# Altium footprint library WR-FPC_0.50mm.PcbLib: 147 footprints (part 3 of 10)
Each footprint in its own frame and in the unit in brackets; x right, y up, seen from the top. Pads: shape width x height; smd on the part's side, far side on the other; paste and mask are expansions set on the pad; w line width, h text height; cw(c..) or ccw(c..) is an arc to the next point about the centre after c.
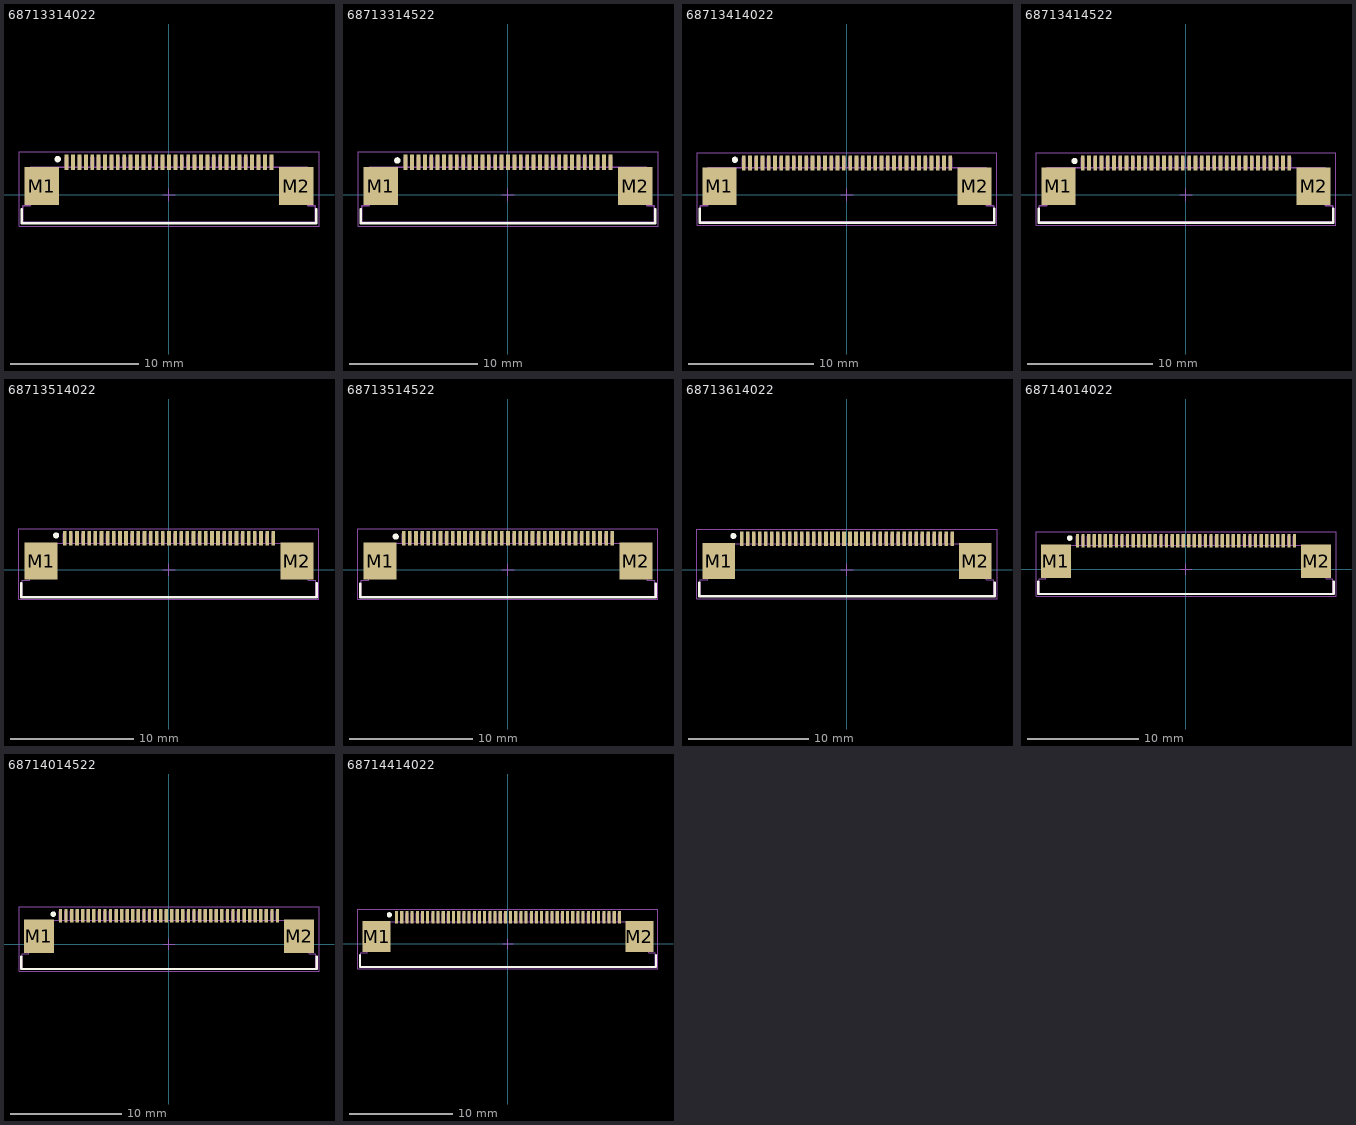
[diagram p2: the footprints below, top view; thin cyan lines are the x and y axes]

## 68713314022 [mm] "ZIF Connectors, Horizontal, Top Contact, pitch 0.5mm, 33p"
height 2.25
pads (35):
  rect 0.3x1.2 smd: 1(-8,2.56) 2(-7.5,2.56) 3(-7,2.56) 4(-6.5,2.56) 5(-6,2.56) 6(-5.5,2.56) 7(-5,2.56) 8(-4.5,2.56) 9(-4,2.56) 10(-3.5,2.56) 11(-3,2.56) 12(-2.5,2.56) 13(-2,2.56) 14(-1.5,2.56) 15(-1,2.56) 16(-0.5,2.56) 17(0,2.56) 18(0.5,2.56) 19(1,2.56) 20(1.5,2.56) 21(2,2.56) 22(2.5,2.56) 23(3,2.56) 24(3.5,2.56) 25(4,2.56) 26(4.5,2.56) 27(5,2.56) 28(5.5,2.56) 29(6,2.56) 30(6.5,2.56) 31(7,2.56) 32(7.5,2.56) 33(8,2.56)
  rect 2.7x3 smd: M1(-9.93,0.7) M2(9.93,0.7)
Top Overlay:
  circle w0.25: c-8.7,2.8 r0.125
  lines w0.2: -11.525,-1.1 -11.525,-2.225 11.525,-2.225 11.525,-1.1
Top Designator:
  text ".Designator" at -7.498,-0.5 h1.5
Top Component Outline:
  lines w0.1: -8.1,2.15 -8.1,2.95 -7.9,2.95 -7.9,2.15 ; -7.6,2.15 -7.6,2.95 -7.4,2.95 -7.4,2.15 ; -7.1,2.15 -7.1,2.95 -6.9,2.95 -6.9,2.15 ; -6.6,2.15 -6.6,2.95 -6.4,2.95 -6.4,2.15 ; -6.1,2.15 -6.1,2.95 -5.9,2.95 -5.9,2.15 ; -5.6,2.15 -5.6,2.95 -5.4,2.95 -5.4,2.15 ; -5.1,2.15 -5.1,2.95 -4.9,2.95 -4.9,2.15 ; -4.6,2.15 -4.6,2.95 -4.4,2.95 -4.4,2.15 ; -4.1,2.15 -4.1,2.95 -3.9,2.95 -3.9,2.15 ; -3.6,2.15 -3.6,2.95 -3.4,2.95 -3.4,2.15 ; -3.1,2.15 -3.1,2.95 -2.9,2.95 -2.9,2.15 ; -2.6,2.15 -2.6,2.95 -2.4,2.95 -2.4,2.15 ; -2.1,2.15 -2.1,2.95 -1.9,2.95 -1.9,2.15 ; -1.6,2.15 -1.6,2.95 -1.4,2.95 -1.4,2.15 ; -1.1,2.15 -1.1,2.95 -0.9,2.95 -0.9,2.15 ; -0.6,2.15 -0.6,2.95 -0.4,2.95 -0.4,2.15 ; -0.1,2.15 -0.1,2.95 0.1,2.95 0.1,2.15 ; 0.4,2.15 0.4,2.95 0.6,2.95 0.6,2.15 ; 0.9,2.15 0.9,2.95 1.1,2.95 1.1,2.15 ; 1.4,2.15 1.4,2.95 1.6,2.95 1.6,2.15 ; 1.9,2.15 1.9,2.95 2.1,2.95 2.1,2.15 ; 2.4,2.15 2.4,2.95 2.6,2.95 2.6,2.15 ; 2.9,2.15 2.9,2.95 3.1,2.95 3.1,2.15 ; 3.4,2.15 3.4,2.95 3.6,2.95 3.6,2.15 ; 3.9,2.15 3.9,2.95 4.1,2.95 4.1,2.15 ; 4.4,2.15 4.4,2.95 4.6,2.95 4.6,2.15 ; 4.9,2.15 4.9,2.95 5.1,2.95 5.1,2.15 ; 5.4,2.15 5.4,2.95 5.6,2.95 5.6,2.15 ; 5.9,2.15 5.9,2.95 6.1,2.95 6.1,2.15 ; 6.4,2.15 6.4,2.95 6.6,2.95 6.6,2.15 ; 6.9,2.15 6.9,2.95 7.1,2.95 7.1,2.15 ; 7.4,2.15 7.4,2.95 7.6,2.95 7.6,2.15 ; 7.9,2.15 7.9,2.95 8.1,2.95 8.1,2.15 ; -11.45,-2.15 -11.45,-0.85 -10.85,-0.85 -10.85,2.15 10.85,2.15 10.85,-0.85 11.45,-0.85 11.45,-2.15 -11.45,-2.15
Top 3D Body:
  lines w0.1: -8.1,2.15 -8.1,2.95 -7.9,2.95 -7.9,2.15 ; -7.6,2.15 -7.6,2.95 -7.4,2.95 -7.4,2.15 ; -7.1,2.15 -7.1,2.95 -6.9,2.95 -6.9,2.15 ; -6.6,2.15 -6.6,2.95 -6.4,2.95 -6.4,2.15 ; -6.1,2.15 -6.1,2.95 -5.9,2.95 -5.9,2.15 ; -5.6,2.15 -5.6,2.95 -5.4,2.95 -5.4,2.15 ; -5.1,2.15 -5.1,2.95 -4.9,2.95 -4.9,2.15 ; -4.6,2.15 -4.6,2.95 -4.4,2.95 -4.4,2.15 ; -4.1,2.15 -4.1,2.95 -3.9,2.95 -3.9,2.15 ; -3.6,2.15 -3.6,2.95 -3.4,2.95 -3.4,2.15 ; -3.1,2.15 -3.1,2.95 -2.9,2.95 -2.9,2.15 ; -2.6,2.15 -2.6,2.95 -2.4,2.95 -2.4,2.15 ; -2.1,2.15 -2.1,2.95 -1.9,2.95 -1.9,2.15 ; -1.6,2.15 -1.6,2.95 -1.4,2.95 -1.4,2.15 ; -1.1,2.15 -1.1,2.95 -0.9,2.95 -0.9,2.15 ; -0.6,2.15 -0.6,2.95 -0.4,2.95 -0.4,2.15 ; -0.1,2.15 -0.1,2.95 0.1,2.95 0.1,2.15 ; 0.4,2.15 0.4,2.95 0.6,2.95 0.6,2.15 ; 0.9,2.15 0.9,2.95 1.1,2.95 1.1,2.15 ; 1.4,2.15 1.4,2.95 1.6,2.95 1.6,2.15 ; 1.9,2.15 1.9,2.95 2.1,2.95 2.1,2.15 ; 2.4,2.15 2.4,2.95 2.6,2.95 2.6,2.15 ; 2.9,2.15 2.9,2.95 3.1,2.95 3.1,2.15 ; 3.4,2.15 3.4,2.95 3.6,2.95 3.6,2.15 ; 3.9,2.15 3.9,2.95 4.1,2.95 4.1,2.15 ; 4.4,2.15 4.4,2.95 4.6,2.95 4.6,2.15 ; 4.9,2.15 4.9,2.95 5.1,2.95 5.1,2.15 ; 5.4,2.15 5.4,2.95 5.6,2.95 5.6,2.15 ; 5.9,2.15 5.9,2.95 6.1,2.95 6.1,2.15 ; 6.4,2.15 6.4,2.95 6.6,2.95 6.6,2.15 ; 6.9,2.15 6.9,2.95 7.1,2.95 7.1,2.15 ; 7.4,2.15 7.4,2.95 7.6,2.95 7.6,2.15 ; 7.9,2.15 7.9,2.95 8.1,2.95 8.1,2.15 ; -11.45,-2.15 11.45,-2.15 11.45,-0.85 10.85,-0.85 10.85,2.15 -10.85,2.15 -10.85,-0.85 -11.45,-0.85 -11.45,-2.15
Top Courtyard:
  lines w0.05: -0.5,0 0.5,0 ; 0,-0.5 0,0.5 ; -11.725,-2.425 -11.725,3.36 11.725,3.36 11.725,-2.425 -11.725,-2.425
3D body "68713314022.stp": height 2.1, standoff 0, extent -11.45,-2.15 11.45,2.95

## 68713314522 [mm] "ZIF Connectors, Horizontal, Bottom Contact, pitch 0.5mm, 33p"
height 2.25
pads (35):
  rect 0.3x1.2 smd: 1(-8,2.56) 2(-7.5,2.56) 3(-7,2.56) 4(-6.5,2.56) 5(-6,2.56) 6(-5.5,2.56) 7(-5,2.56) 8(-4.5,2.56) 9(-4,2.56) 10(-3.5,2.56) 11(-3,2.56) 12(-2.5,2.56) 13(-2,2.56) 14(-1.5,2.56) 15(-1,2.56) 16(-0.5,2.56) 17(0,2.56) 18(0.5,2.56) 19(1,2.56) 20(1.5,2.56) 21(2,2.56) 22(2.5,2.56) 23(3,2.56) 24(3.5,2.56) 25(4,2.56) 26(4.5,2.56) 27(5,2.56) 28(5.5,2.56) 29(6,2.56) 30(6.5,2.56) 31(7,2.56) 32(7.5,2.56) 33(8,2.56)
  rect 2.7x3 smd: M1(-9.93,0.7) M2(9.93,0.7)
Top Overlay:
  circle w0.25: c-8.65,2.7 r0.125
  lines w0.2: -11.525,-1.125 -11.525,-2.225 11.525,-2.225 11.525,-1.125
Top Designator:
  text ".Designator" at -7.498,-0.5 h1.5
Top Component Outline:
  lines w0.1: -8.1,2.15 -8.1,2.95 -7.9,2.95 -7.9,2.15 ; -7.6,2.15 -7.6,2.95 -7.4,2.95 -7.4,2.15 ; -7.1,2.15 -7.1,2.95 -6.9,2.95 -6.9,2.15 ; -6.6,2.15 -6.6,2.95 -6.4,2.95 -6.4,2.15 ; -6.1,2.15 -6.1,2.95 -5.9,2.95 -5.9,2.15 ; -5.6,2.15 -5.6,2.95 -5.4,2.95 -5.4,2.15 ; -5.1,2.15 -5.1,2.95 -4.9,2.95 -4.9,2.15 ; -4.6,2.15 -4.6,2.95 -4.4,2.95 -4.4,2.15 ; -4.1,2.15 -4.1,2.95 -3.9,2.95 -3.9,2.15 ; -3.6,2.15 -3.6,2.95 -3.4,2.95 -3.4,2.15 ; -3.1,2.15 -3.1,2.95 -2.9,2.95 -2.9,2.15 ; -2.6,2.15 -2.6,2.95 -2.4,2.95 -2.4,2.15 ; -2.1,2.15 -2.1,2.95 -1.9,2.95 -1.9,2.15 ; -1.6,2.15 -1.6,2.95 -1.4,2.95 -1.4,2.15 ; -1.1,2.15 -1.1,2.95 -0.9,2.95 -0.9,2.15 ; -0.6,2.15 -0.6,2.95 -0.4,2.95 -0.4,2.15 ; -0.1,2.15 -0.1,2.95 0.1,2.95 0.1,2.15 ; 0.4,2.15 0.4,2.95 0.6,2.95 0.6,2.15 ; 0.9,2.15 0.9,2.95 1.1,2.95 1.1,2.15 ; 1.4,2.15 1.4,2.95 1.6,2.95 1.6,2.15 ; 1.9,2.15 1.9,2.95 2.1,2.95 2.1,2.15 ; 2.4,2.15 2.4,2.95 2.6,2.95 2.6,2.15 ; 2.9,2.15 2.9,2.95 3.1,2.95 3.1,2.15 ; 3.4,2.15 3.4,2.95 3.6,2.95 3.6,2.15 ; 3.9,2.15 3.9,2.95 4.1,2.95 4.1,2.15 ; 4.4,2.15 4.4,2.95 4.6,2.95 4.6,2.15 ; 4.9,2.15 4.9,2.95 5.1,2.95 5.1,2.15 ; 5.4,2.15 5.4,2.95 5.6,2.95 5.6,2.15 ; 5.9,2.15 5.9,2.95 6.1,2.95 6.1,2.15 ; 6.4,2.15 6.4,2.95 6.6,2.95 6.6,2.15 ; 6.9,2.15 6.9,2.95 7.1,2.95 7.1,2.15 ; 7.4,2.15 7.4,2.95 7.6,2.95 7.6,2.15 ; 7.9,2.15 7.9,2.95 8.1,2.95 8.1,2.15 ; -11.45,-2.15 -11.45,-0.85 -10.85,-0.85 -10.85,2.15 10.85,2.15 10.85,-0.85 11.45,-0.85 11.45,-2.15 -11.45,-2.15
Top 3D Body:
  lines w0.1: -8.1,2.15 -8.1,2.95 -7.9,2.95 -7.9,2.15 ; -7.6,2.15 -7.6,2.95 -7.4,2.95 -7.4,2.15 ; -7.1,2.15 -7.1,2.95 -6.9,2.95 -6.9,2.15 ; -6.6,2.15 -6.6,2.95 -6.4,2.95 -6.4,2.15 ; -6.1,2.15 -6.1,2.95 -5.9,2.95 -5.9,2.15 ; -5.6,2.15 -5.6,2.95 -5.4,2.95 -5.4,2.15 ; -5.1,2.15 -5.1,2.95 -4.9,2.95 -4.9,2.15 ; -4.6,2.15 -4.6,2.95 -4.4,2.95 -4.4,2.15 ; -4.1,2.15 -4.1,2.95 -3.9,2.95 -3.9,2.15 ; -3.6,2.15 -3.6,2.95 -3.4,2.95 -3.4,2.15 ; -3.1,2.15 -3.1,2.95 -2.9,2.95 -2.9,2.15 ; -2.6,2.15 -2.6,2.95 -2.4,2.95 -2.4,2.15 ; -2.1,2.15 -2.1,2.95 -1.9,2.95 -1.9,2.15 ; -1.6,2.15 -1.6,2.95 -1.4,2.95 -1.4,2.15 ; -1.1,2.15 -1.1,2.95 -0.9,2.95 -0.9,2.15 ; -0.6,2.15 -0.6,2.95 -0.4,2.95 -0.4,2.15 ; -0.1,2.15 -0.1,2.95 0.1,2.95 0.1,2.15 ; 0.4,2.15 0.4,2.95 0.6,2.95 0.6,2.15 ; 0.9,2.15 0.9,2.95 1.1,2.95 1.1,2.15 ; 1.4,2.15 1.4,2.95 1.6,2.95 1.6,2.15 ; 1.9,2.15 1.9,2.95 2.1,2.95 2.1,2.15 ; 2.4,2.15 2.4,2.95 2.6,2.95 2.6,2.15 ; 2.9,2.15 2.9,2.95 3.1,2.95 3.1,2.15 ; 3.4,2.15 3.4,2.95 3.6,2.95 3.6,2.15 ; 3.9,2.15 3.9,2.95 4.1,2.95 4.1,2.15 ; 4.4,2.15 4.4,2.95 4.6,2.95 4.6,2.15 ; 4.9,2.15 4.9,2.95 5.1,2.95 5.1,2.15 ; 5.4,2.15 5.4,2.95 5.6,2.95 5.6,2.15 ; 5.9,2.15 5.9,2.95 6.1,2.95 6.1,2.15 ; 6.4,2.15 6.4,2.95 6.6,2.95 6.6,2.15 ; 6.9,2.15 6.9,2.95 7.1,2.95 7.1,2.15 ; 7.4,2.15 7.4,2.95 7.6,2.95 7.6,2.15 ; 7.9,2.15 7.9,2.95 8.1,2.95 8.1,2.15 ; -11.45,-2.15 11.45,-2.15 11.45,-0.85 10.85,-0.85 10.85,2.15 -10.85,2.15 -10.85,-0.85 -11.45,-0.85 -11.45,-2.15
Top Courtyard:
  lines w0.05: -0.5,0 0.5,0 ; 0,-0.5 0,0.5 ; -11.725,-2.425 11.725,-2.425 11.725,3.36 -11.725,3.36 -11.725,-2.425
3D body "68713314522.stp": height 2.1, standoff 0, extent -11.45,-2.15 11.45,2.95

## 68713414022 [mm] "ZIF Connectors, Horizontal, Top Contact, pitch 0.5mm, 34p"
height 2.25
pads (36):
  rect 0.3x1.2 smd: 1(-8.25,2.56) 2(-7.75,2.56) 3(-7.25,2.56) 4(-6.75,2.56) 5(-6.25,2.56) 6(-5.75,2.56) 7(-5.25,2.56) 8(-4.75,2.56) 9(-4.25,2.56) 10(-3.75,2.56) 11(-3.25,2.56) 12(-2.75,2.56) 13(-2.25,2.56) 14(-1.75,2.56) 15(-1.25,2.56) 16(-0.75,2.56) 17(-0.25,2.56) 18(0.25,2.56) 19(0.75,2.56) 20(1.25,2.56) 21(1.75,2.56) 22(2.25,2.56) 23(2.75,2.56) 24(3.25,2.56) 25(3.75,2.56) 26(4.25,2.56) 27(4.75,2.56) 28(5.25,2.56) 29(5.75,2.56) 30(6.25,2.56) 31(6.75,2.56) 32(7.25,2.56) 33(7.75,2.56) 34(8.25,2.56)
  rect 2.7x3 smd: M1(-10.18,0.7) M2(10.18,0.7)
Top Overlay:
  circle w0.25: c-8.95,2.8 r0.125
  lines w0.2: -11.775,-1.1 -11.775,-2.225 11.775,-2.225 11.775,-1.1
Top Designator:
  text ".Designator" at -7.498,-0.5 h1.5
Top Component Outline:
  lines w0.1: -8.35,2.15 -8.35,2.95 -8.15,2.95 -8.15,2.15 ; -7.85,2.15 -7.85,2.95 -7.65,2.95 -7.65,2.15 ; -7.35,2.15 -7.35,2.95 -7.15,2.95 -7.15,2.15 ; -6.85,2.15 -6.85,2.95 -6.65,2.95 -6.65,2.15 ; -6.35,2.15 -6.35,2.95 -6.15,2.95 -6.15,2.15 ; -5.85,2.15 -5.85,2.95 -5.65,2.95 -5.65,2.15 ; -5.35,2.15 -5.35,2.95 -5.15,2.95 -5.15,2.15 ; -4.85,2.15 -4.85,2.95 -4.65,2.95 -4.65,2.15 ; -4.35,2.15 -4.35,2.95 -4.15,2.95 -4.15,2.15 ; -3.85,2.15 -3.85,2.95 -3.65,2.95 -3.65,2.15 ; -3.35,2.15 -3.35,2.95 -3.15,2.95 -3.15,2.15 ; -2.85,2.15 -2.85,2.95 -2.65,2.95 -2.65,2.15 ; -2.35,2.15 -2.35,2.95 -2.15,2.95 -2.15,2.15 ; -1.85,2.15 -1.85,2.95 -1.65,2.95 -1.65,2.15 ; -1.35,2.15 -1.35,2.95 -1.15,2.95 -1.15,2.15 ; -0.85,2.15 -0.85,2.95 -0.65,2.95 -0.65,2.15 ; -0.35,2.15 -0.35,2.95 -0.15,2.95 -0.15,2.15 ; 0.15,2.15 0.15,2.95 0.35,2.95 0.35,2.15 ; 0.65,2.15 0.65,2.95 0.85,2.95 0.85,2.15 ; 1.15,2.15 1.15,2.95 1.35,2.95 1.35,2.15 ; 1.65,2.15 1.65,2.95 1.85,2.95 1.85,2.15 ; 2.15,2.15 2.15,2.95 2.35,2.95 2.35,2.15 ; 2.65,2.15 2.65,2.95 2.85,2.95 2.85,2.15 ; 3.15,2.15 3.15,2.95 3.35,2.95 3.35,2.15 ; 3.65,2.15 3.65,2.95 3.85,2.95 3.85,2.15 ; 4.15,2.15 4.15,2.95 4.35,2.95 4.35,2.15 ; 4.65,2.15 4.65,2.95 4.85,2.95 4.85,2.15 ; 5.15,2.15 5.15,2.95 5.35,2.95 5.35,2.15 ; 5.65,2.15 5.65,2.95 5.85,2.95 5.85,2.15 ; 6.15,2.15 6.15,2.95 6.35,2.95 6.35,2.15 ; 6.65,2.15 6.65,2.95 6.85,2.95 6.85,2.15 ; 7.15,2.15 7.15,2.95 7.35,2.95 7.35,2.15 ; 7.65,2.15 7.65,2.95 7.85,2.95 7.85,2.15 ; 8.15,2.15 8.15,2.95 8.35,2.95 8.35,2.15 ; -11.7,-2.15 11.7,-2.15 11.7,-0.85 11.1,-0.85 11.1,2.15 -11.1,2.15 -11.1,-0.85 -11.7,-0.85 -11.7,-2.15
Top 3D Body:
  lines w0.1: -8.35,2.15 -8.35,2.95 -8.15,2.95 -8.15,2.15 ; -7.85,2.15 -7.85,2.95 -7.65,2.95 -7.65,2.15 ; -7.35,2.15 -7.35,2.95 -7.15,2.95 -7.15,2.15 ; -6.85,2.15 -6.85,2.95 -6.65,2.95 -6.65,2.15 ; -6.35,2.15 -6.35,2.95 -6.15,2.95 -6.15,2.15 ; -5.85,2.15 -5.85,2.95 -5.65,2.95 -5.65,2.15 ; -5.35,2.15 -5.35,2.95 -5.15,2.95 -5.15,2.15 ; -4.85,2.15 -4.85,2.95 -4.65,2.95 -4.65,2.15 ; -4.35,2.15 -4.35,2.95 -4.15,2.95 -4.15,2.15 ; -3.85,2.15 -3.85,2.95 -3.65,2.95 -3.65,2.15 ; -3.35,2.15 -3.35,2.95 -3.15,2.95 -3.15,2.15 ; -2.85,2.15 -2.85,2.95 -2.65,2.95 -2.65,2.15 ; -2.35,2.15 -2.35,2.95 -2.15,2.95 -2.15,2.15 ; -1.85,2.15 -1.85,2.95 -1.65,2.95 -1.65,2.15 ; -1.35,2.15 -1.35,2.95 -1.15,2.95 -1.15,2.15 ; -0.85,2.15 -0.85,2.95 -0.65,2.95 -0.65,2.15 ; -0.35,2.15 -0.35,2.95 -0.15,2.95 -0.15,2.15 ; 0.15,2.15 0.15,2.95 0.35,2.95 0.35,2.15 ; 0.65,2.15 0.65,2.95 0.85,2.95 0.85,2.15 ; 1.15,2.15 1.15,2.95 1.35,2.95 1.35,2.15 ; 1.65,2.15 1.65,2.95 1.85,2.95 1.85,2.15 ; 2.15,2.15 2.15,2.95 2.35,2.95 2.35,2.15 ; 2.65,2.15 2.65,2.95 2.85,2.95 2.85,2.15 ; 3.15,2.15 3.15,2.95 3.35,2.95 3.35,2.15 ; 3.65,2.15 3.65,2.95 3.85,2.95 3.85,2.15 ; 4.15,2.15 4.15,2.95 4.35,2.95 4.35,2.15 ; 4.65,2.15 4.65,2.95 4.85,2.95 4.85,2.15 ; 5.15,2.15 5.15,2.95 5.35,2.95 5.35,2.15 ; 5.65,2.15 5.65,2.95 5.85,2.95 5.85,2.15 ; 6.15,2.15 6.15,2.95 6.35,2.95 6.35,2.15 ; 6.65,2.15 6.65,2.95 6.85,2.95 6.85,2.15 ; 7.15,2.15 7.15,2.95 7.35,2.95 7.35,2.15 ; 7.65,2.15 7.65,2.95 7.85,2.95 7.85,2.15 ; 8.15,2.15 8.15,2.95 8.35,2.95 8.35,2.15 ; -11.7,-2.15 -11.7,-0.85 -11.1,-0.85 -11.1,2.15 11.1,2.15 11.1,-0.85 11.7,-0.85 11.7,-2.15 -11.7,-2.15
Top Courtyard:
  lines w0.05: -0.5,0 0.5,0 ; 0,-0.5 0,0.5 ; -11.975,-2.425 11.975,-2.425 11.975,3.36 -11.975,3.36 -11.975,-2.425
3D body "68713414022.stp": height 2.1, standoff 0, extent -11.7,-2.15 11.7,2.95

## 68713414522 [mm] "ZIF Connectors, Horizontal, Bottom Contact, pitch 0.5mm, 34p"
height 2.25
pads (36):
  rect 0.3x1.2 smd: 1(-8.25,2.56) 2(-7.75,2.56) 3(-7.25,2.56) 4(-6.75,2.56) 5(-6.25,2.56) 6(-5.75,2.56) 7(-5.25,2.56) 8(-4.75,2.56) 9(-4.25,2.56) 10(-3.75,2.56) 11(-3.25,2.56) 12(-2.75,2.56) 13(-2.25,2.56) 14(-1.75,2.56) 15(-1.25,2.56) 16(-0.75,2.56) 17(-0.25,2.56) 18(0.25,2.56) 19(0.75,2.56) 20(1.25,2.56) 21(1.75,2.56) 22(2.25,2.56) 23(2.75,2.56) 24(3.25,2.56) 25(3.75,2.56) 26(4.25,2.56) 27(4.75,2.56) 28(5.25,2.56) 29(5.75,2.56) 30(6.25,2.56) 31(6.75,2.56) 32(7.25,2.56) 33(7.75,2.56) 34(8.25,2.56)
  rect 2.7x3 smd: M1(-10.18,0.7) M2(10.18,0.7)
Top Overlay:
  circle w0.25: c-8.9,2.7 r0.125
  lines w0.2: -11.775,-1.125 -11.775,-2.225 11.775,-2.225 11.775,-1.125
Top Designator:
  text ".Designator" at -7.498,-0.5 h1.5
Top Component Outline:
  lines w0.1: -8.35,2.15 -8.35,2.95 -8.15,2.95 -8.15,2.15 ; -7.85,2.15 -7.85,2.95 -7.65,2.95 -7.65,2.15 ; -7.35,2.15 -7.35,2.95 -7.15,2.95 -7.15,2.15 ; -6.85,2.15 -6.85,2.95 -6.65,2.95 -6.65,2.15 ; -6.35,2.15 -6.35,2.95 -6.15,2.95 -6.15,2.15 ; -5.85,2.15 -5.85,2.95 -5.65,2.95 -5.65,2.15 ; -5.35,2.15 -5.35,2.95 -5.15,2.95 -5.15,2.15 ; -4.85,2.15 -4.85,2.95 -4.65,2.95 -4.65,2.15 ; -4.35,2.15 -4.35,2.95 -4.15,2.95 -4.15,2.15 ; -3.85,2.15 -3.85,2.95 -3.65,2.95 -3.65,2.15 ; -3.35,2.15 -3.35,2.95 -3.15,2.95 -3.15,2.15 ; -2.85,2.15 -2.85,2.95 -2.65,2.95 -2.65,2.15 ; -2.35,2.15 -2.35,2.95 -2.15,2.95 -2.15,2.15 ; -1.85,2.15 -1.85,2.95 -1.65,2.95 -1.65,2.15 ; -1.35,2.15 -1.35,2.95 -1.15,2.95 -1.15,2.15 ; -0.85,2.15 -0.85,2.95 -0.65,2.95 -0.65,2.15 ; -0.35,2.15 -0.35,2.95 -0.15,2.95 -0.15,2.15 ; 0.15,2.15 0.15,2.95 0.35,2.95 0.35,2.15 ; 0.65,2.15 0.65,2.95 0.85,2.95 0.85,2.15 ; 1.15,2.15 1.15,2.95 1.35,2.95 1.35,2.15 ; 1.65,2.15 1.65,2.95 1.85,2.95 1.85,2.15 ; 2.15,2.15 2.15,2.95 2.35,2.95 2.35,2.15 ; 2.65,2.15 2.65,2.95 2.85,2.95 2.85,2.15 ; 3.15,2.15 3.15,2.95 3.35,2.95 3.35,2.15 ; 3.65,2.15 3.65,2.95 3.85,2.95 3.85,2.15 ; 4.15,2.15 4.15,2.95 4.35,2.95 4.35,2.15 ; 4.65,2.15 4.65,2.95 4.85,2.95 4.85,2.15 ; 5.15,2.15 5.15,2.95 5.35,2.95 5.35,2.15 ; 5.65,2.15 5.65,2.95 5.85,2.95 5.85,2.15 ; 6.15,2.15 6.15,2.95 6.35,2.95 6.35,2.15 ; 6.65,2.15 6.65,2.95 6.85,2.95 6.85,2.15 ; 7.15,2.15 7.15,2.95 7.35,2.95 7.35,2.15 ; 7.65,2.15 7.65,2.95 7.85,2.95 7.85,2.15 ; 8.15,2.15 8.15,2.95 8.35,2.95 8.35,2.15 ; -11.7,-2.15 -11.7,-0.85 -11.1,-0.85 -11.1,2.15 11.1,2.15 11.1,-0.85 11.7,-0.85 11.7,-2.15 -11.7,-2.15
Top 3D Body:
  lines w0.1: -8.35,2.15 -8.35,2.95 -8.15,2.95 -8.15,2.15 ; -7.85,2.15 -7.85,2.95 -7.65,2.95 -7.65,2.15 ; -7.35,2.15 -7.35,2.95 -7.15,2.95 -7.15,2.15 ; -6.85,2.15 -6.85,2.95 -6.65,2.95 -6.65,2.15 ; -6.35,2.15 -6.35,2.95 -6.15,2.95 -6.15,2.15 ; -5.85,2.15 -5.85,2.95 -5.65,2.95 -5.65,2.15 ; -5.35,2.15 -5.35,2.95 -5.15,2.95 -5.15,2.15 ; -4.85,2.15 -4.85,2.95 -4.65,2.95 -4.65,2.15 ; -4.35,2.15 -4.35,2.95 -4.15,2.95 -4.15,2.15 ; -3.85,2.15 -3.85,2.95 -3.65,2.95 -3.65,2.15 ; -3.35,2.15 -3.35,2.95 -3.15,2.95 -3.15,2.15 ; -2.85,2.15 -2.85,2.95 -2.65,2.95 -2.65,2.15 ; -2.35,2.15 -2.35,2.95 -2.15,2.95 -2.15,2.15 ; -1.85,2.15 -1.85,2.95 -1.65,2.95 -1.65,2.15 ; -1.35,2.15 -1.35,2.95 -1.15,2.95 -1.15,2.15 ; -0.85,2.15 -0.85,2.95 -0.65,2.95 -0.65,2.15 ; -0.35,2.15 -0.35,2.95 -0.15,2.95 -0.15,2.15 ; 0.15,2.15 0.15,2.95 0.35,2.95 0.35,2.15 ; 0.65,2.15 0.65,2.95 0.85,2.95 0.85,2.15 ; 1.15,2.15 1.15,2.95 1.35,2.95 1.35,2.15 ; 1.65,2.15 1.65,2.95 1.85,2.95 1.85,2.15 ; 2.15,2.15 2.15,2.95 2.35,2.95 2.35,2.15 ; 2.65,2.15 2.65,2.95 2.85,2.95 2.85,2.15 ; 3.15,2.15 3.15,2.95 3.35,2.95 3.35,2.15 ; 3.65,2.15 3.65,2.95 3.85,2.95 3.85,2.15 ; 4.15,2.15 4.15,2.95 4.35,2.95 4.35,2.15 ; 4.65,2.15 4.65,2.95 4.85,2.95 4.85,2.15 ; 5.15,2.15 5.15,2.95 5.35,2.95 5.35,2.15 ; 5.65,2.15 5.65,2.95 5.85,2.95 5.85,2.15 ; 6.15,2.15 6.15,2.95 6.35,2.95 6.35,2.15 ; 6.65,2.15 6.65,2.95 6.85,2.95 6.85,2.15 ; 7.15,2.15 7.15,2.95 7.35,2.95 7.35,2.15 ; 7.65,2.15 7.65,2.95 7.85,2.95 7.85,2.15 ; 8.15,2.15 8.15,2.95 8.35,2.95 8.35,2.15 ; -11.7,-2.15 11.7,-2.15 11.7,-0.85 11.1,-0.85 11.1,2.15 -11.1,2.15 -11.1,-0.85 -11.7,-0.85 -11.7,-2.15
Top Courtyard:
  lines w0.05: -0.5,0 0.5,0 ; 0,-0.5 0,0.5 ; -11.975,-2.425 11.975,-2.425 11.975,3.36 -11.975,3.36 -11.975,-2.425
3D body "68713414522.stp": height 2.1, standoff 0, extent -11.7,-2.15 11.7,2.95

## 68713514022 [mm] "ZIF Connectors, Horizontal, Top Contact, pitch 0.5mm, 35p"
height 2.25
pads (37):
  rect 0.3x1.2 smd: 1(-8.5,2.56) 2(-8,2.56) 3(-7.5,2.56) 4(-7,2.56) 5(-6.5,2.56) 6(-6,2.56) 7(-5.5,2.56) 8(-5,2.56) 9(-4.5,2.56) 10(-4,2.56) 11(-3.5,2.56) 12(-3,2.56) 13(-2.5,2.56) 14(-2,2.56) 15(-1.5,2.56) 16(-1,2.56) 17(-0.5,2.56) 18(0,2.56) 19(0.5,2.56) 20(1,2.56) 21(1.5,2.56) 22(2,2.56) 23(2.5,2.56) 24(3,2.56) 25(3.5,2.56) 26(4,2.56) 27(4.5,2.56) 28(5,2.56) 29(5.5,2.56) 30(6,2.56) 31(6.5,2.56) 32(7,2.56) 33(7.5,2.56) 34(8,2.56) 35(8.5,2.56)
  rect 2.7x3 smd: M1(-10.43,0.7) M2(10.43,0.7)
Top Overlay:
  circle w0.25: c-9.2,2.8 r0.125
  lines w0.2: -12.025,-1.1 -12.025,-2.225 12.025,-2.225 12.025,-1.1
Top Designator:
  text ".Designator" at -7.498,-0.5 h1.5
Top Component Outline:
  lines w0.1: -8.6,2.15 -8.6,2.95 -8.4,2.95 -8.4,2.15 ; -8.1,2.15 -8.1,2.95 -7.9,2.95 -7.9,2.15 ; -7.6,2.15 -7.6,2.95 -7.4,2.95 -7.4,2.15 ; -7.1,2.15 -7.1,2.95 -6.9,2.95 -6.9,2.15 ; -6.6,2.15 -6.6,2.95 -6.4,2.95 -6.4,2.15 ; -6.1,2.15 -6.1,2.95 -5.9,2.95 -5.9,2.15 ; -5.6,2.15 -5.6,2.95 -5.4,2.95 -5.4,2.15 ; -5.1,2.15 -5.1,2.95 -4.9,2.95 -4.9,2.15 ; -4.6,2.15 -4.6,2.95 -4.4,2.95 -4.4,2.15 ; -4.1,2.15 -4.1,2.95 -3.9,2.95 -3.9,2.15 ; -3.6,2.15 -3.6,2.95 -3.4,2.95 -3.4,2.15 ; -3.1,2.15 -3.1,2.95 -2.9,2.95 -2.9,2.15 ; -2.6,2.15 -2.6,2.95 -2.4,2.95 -2.4,2.15 ; -2.1,2.15 -2.1,2.95 -1.9,2.95 -1.9,2.15 ; -1.6,2.15 -1.6,2.95 -1.4,2.95 -1.4,2.15 ; -1.1,2.15 -1.1,2.95 -0.9,2.95 -0.9,2.15 ; -0.6,2.15 -0.6,2.95 -0.4,2.95 -0.4,2.15 ; -0.1,2.15 -0.1,2.95 0.1,2.95 0.1,2.15 ; 0.4,2.15 0.4,2.95 0.6,2.95 0.6,2.15 ; 0.9,2.15 0.9,2.95 1.1,2.95 1.1,2.15 ; 1.4,2.15 1.4,2.95 1.6,2.95 1.6,2.15 ; 1.9,2.15 1.9,2.95 2.1,2.95 2.1,2.15 ; 2.4,2.15 2.4,2.95 2.6,2.95 2.6,2.15 ; 2.9,2.15 2.9,2.95 3.1,2.95 3.1,2.15 ; 3.4,2.15 3.4,2.95 3.6,2.95 3.6,2.15 ; 3.9,2.15 3.9,2.95 4.1,2.95 4.1,2.15 ; 4.4,2.15 4.4,2.95 4.6,2.95 4.6,2.15 ; 4.9,2.15 4.9,2.95 5.1,2.95 5.1,2.15 ; 5.4,2.15 5.4,2.95 5.6,2.95 5.6,2.15 ; 5.9,2.15 5.9,2.95 6.1,2.95 6.1,2.15 ; 6.4,2.15 6.4,2.95 6.6,2.95 6.6,2.15 ; 6.9,2.15 6.9,2.95 7.1,2.95 7.1,2.15 ; 7.4,2.15 7.4,2.95 7.6,2.95 7.6,2.15 ; 7.9,2.15 7.9,2.95 8.1,2.95 8.1,2.15 ; 8.4,2.15 8.4,2.95 8.6,2.95 8.6,2.15 ; -11.95,-2.15 -11.95,-0.85 -11.35,-0.85 -11.35,2.15 11.35,2.15 11.35,-0.85 11.95,-0.85 11.95,-2.15 -11.95,-2.15
Top 3D Body:
  lines w0.1: -8.6,2.15 -8.6,2.95 -8.4,2.95 -8.4,2.15 ; -8.1,2.15 -8.1,2.95 -7.9,2.95 -7.9,2.15 ; -7.6,2.15 -7.6,2.95 -7.4,2.95 -7.4,2.15 ; -7.1,2.15 -7.1,2.95 -6.9,2.95 -6.9,2.15 ; -6.6,2.15 -6.6,2.95 -6.4,2.95 -6.4,2.15 ; -6.1,2.15 -6.1,2.95 -5.9,2.95 -5.9,2.15 ; -5.6,2.15 -5.6,2.95 -5.4,2.95 -5.4,2.15 ; -5.1,2.15 -5.1,2.95 -4.9,2.95 -4.9,2.15 ; -4.6,2.15 -4.6,2.95 -4.4,2.95 -4.4,2.15 ; -4.1,2.15 -4.1,2.95 -3.9,2.95 -3.9,2.15 ; -3.6,2.15 -3.6,2.95 -3.4,2.95 -3.4,2.15 ; -3.1,2.15 -3.1,2.95 -2.9,2.95 -2.9,2.15 ; -2.6,2.15 -2.6,2.95 -2.4,2.95 -2.4,2.15 ; -2.1,2.15 -2.1,2.95 -1.9,2.95 -1.9,2.15 ; -1.6,2.15 -1.6,2.95 -1.4,2.95 -1.4,2.15 ; -1.1,2.15 -1.1,2.95 -0.9,2.95 -0.9,2.15 ; -0.6,2.15 -0.6,2.95 -0.4,2.95 -0.4,2.15 ; -0.1,2.15 -0.1,2.95 0.1,2.95 0.1,2.15 ; 0.4,2.15 0.4,2.95 0.6,2.95 0.6,2.15 ; 0.9,2.15 0.9,2.95 1.1,2.95 1.1,2.15 ; 1.4,2.15 1.4,2.95 1.6,2.95 1.6,2.15 ; 1.9,2.15 1.9,2.95 2.1,2.95 2.1,2.15 ; 2.4,2.15 2.4,2.95 2.6,2.95 2.6,2.15 ; 2.9,2.15 2.9,2.95 3.1,2.95 3.1,2.15 ; 3.4,2.15 3.4,2.95 3.6,2.95 3.6,2.15 ; 3.9,2.15 3.9,2.95 4.1,2.95 4.1,2.15 ; 4.4,2.15 4.4,2.95 4.6,2.95 4.6,2.15 ; 4.9,2.15 4.9,2.95 5.1,2.95 5.1,2.15 ; 5.4,2.15 5.4,2.95 5.6,2.95 5.6,2.15 ; 5.9,2.15 5.9,2.95 6.1,2.95 6.1,2.15 ; 6.4,2.15 6.4,2.95 6.6,2.95 6.6,2.15 ; 6.9,2.15 6.9,2.95 7.1,2.95 7.1,2.15 ; 7.4,2.15 7.4,2.95 7.6,2.95 7.6,2.15 ; 7.9,2.15 7.9,2.95 8.1,2.95 8.1,2.15 ; 8.4,2.15 8.4,2.95 8.6,2.95 8.6,2.15 ; -11.95,-2.15 11.95,-2.15 11.95,-0.85 11.35,-0.85 11.35,2.15 -11.35,2.15 -11.35,-0.85 -11.95,-0.85 -11.95,-2.15
Top Courtyard:
  lines w0.05: -0.5,0 0.5,0 ; 0,-0.5 0,0.5 ; -12.225,-2.425 -12.225,3.36 12.225,3.36 12.225,-2.425 -12.225,-2.425
3D body "68713514022.stp": height 2.1, standoff 0, extent -11.95,-2.15 11.95,2.95

## 68713514522 [mm] "ZIF Connectors, Horizontal, Bottom Contact, pitch 0.5mm, 35p"
height 2.25
pads (37):
  rect 0.3x1.2 smd: 1(-8.5,2.56) 2(-8,2.56) 3(-7.5,2.56) 4(-7,2.56) 5(-6.5,2.56) 6(-6,2.56) 7(-5.5,2.56) 8(-5,2.56) 9(-4.5,2.56) 10(-4,2.56) 11(-3.5,2.56) 12(-3,2.56) 13(-2.5,2.56) 14(-2,2.56) 15(-1.5,2.56) 16(-1,2.56) 17(-0.5,2.56) 18(0,2.56) 19(0.5,2.56) 20(1,2.56) 21(1.5,2.56) 22(2,2.56) 23(2.5,2.56) 24(3,2.56) 25(3.5,2.56) 26(4,2.56) 27(4.5,2.56) 28(5,2.56) 29(5.5,2.56) 30(6,2.56) 31(6.5,2.56) 32(7,2.56) 33(7.5,2.56) 34(8,2.56) 35(8.5,2.56)
  rect 2.7x3 smd: M1(-10.43,0.7) M2(10.43,0.7)
Top Overlay:
  circle w0.25: c-9.15,2.7 r0.125
  lines w0.2: -12.025,-1.125 -12.025,-2.225 12.025,-2.225 12.025,-1.125
Top Designator:
  text ".Designator" at -7.498,-0.5 h1.5
Top Component Outline:
  lines w0.1: -8.6,2.15 -8.6,2.95 -8.4,2.95 -8.4,2.15 ; -8.1,2.15 -8.1,2.95 -7.9,2.95 -7.9,2.15 ; -7.6,2.15 -7.6,2.95 -7.4,2.95 -7.4,2.15 ; -7.1,2.15 -7.1,2.95 -6.9,2.95 -6.9,2.15 ; -6.6,2.15 -6.6,2.95 -6.4,2.95 -6.4,2.15 ; -6.1,2.15 -6.1,2.95 -5.9,2.95 -5.9,2.15 ; -5.6,2.15 -5.6,2.95 -5.4,2.95 -5.4,2.15 ; -5.1,2.15 -5.1,2.95 -4.9,2.95 -4.9,2.15 ; -4.6,2.15 -4.6,2.95 -4.4,2.95 -4.4,2.15 ; -4.1,2.15 -4.1,2.95 -3.9,2.95 -3.9,2.15 ; -3.6,2.15 -3.6,2.95 -3.4,2.95 -3.4,2.15 ; -3.1,2.15 -3.1,2.95 -2.9,2.95 -2.9,2.15 ; -2.6,2.15 -2.6,2.95 -2.4,2.95 -2.4,2.15 ; -2.1,2.15 -2.1,2.95 -1.9,2.95 -1.9,2.15 ; -1.6,2.15 -1.6,2.95 -1.4,2.95 -1.4,2.15 ; -1.1,2.15 -1.1,2.95 -0.9,2.95 -0.9,2.15 ; -0.6,2.15 -0.6,2.95 -0.4,2.95 -0.4,2.15 ; -0.1,2.15 -0.1,2.95 0.1,2.95 0.1,2.15 ; 0.4,2.15 0.4,2.95 0.6,2.95 0.6,2.15 ; 0.9,2.15 0.9,2.95 1.1,2.95 1.1,2.15 ; 1.4,2.15 1.4,2.95 1.6,2.95 1.6,2.15 ; 1.9,2.15 1.9,2.95 2.1,2.95 2.1,2.15 ; 2.4,2.15 2.4,2.95 2.6,2.95 2.6,2.15 ; 2.9,2.15 2.9,2.95 3.1,2.95 3.1,2.15 ; 3.4,2.15 3.4,2.95 3.6,2.95 3.6,2.15 ; 3.9,2.15 3.9,2.95 4.1,2.95 4.1,2.15 ; 4.4,2.15 4.4,2.95 4.6,2.95 4.6,2.15 ; 4.9,2.15 4.9,2.95 5.1,2.95 5.1,2.15 ; 5.4,2.15 5.4,2.95 5.6,2.95 5.6,2.15 ; 5.9,2.15 5.9,2.95 6.1,2.95 6.1,2.15 ; 6.4,2.15 6.4,2.95 6.6,2.95 6.6,2.15 ; 6.9,2.15 6.9,2.95 7.1,2.95 7.1,2.15 ; 7.4,2.15 7.4,2.95 7.6,2.95 7.6,2.15 ; 7.9,2.15 7.9,2.95 8.1,2.95 8.1,2.15 ; 8.4,2.15 8.4,2.95 8.6,2.95 8.6,2.15 ; -11.95,-2.15 -11.95,-0.85 -11.35,-0.85 -11.35,2.15 11.35,2.15 11.35,-0.85 11.95,-0.85 11.95,-2.15 -11.95,-2.15
Top 3D Body:
  lines w0.1: -8.6,2.15 -8.6,2.95 -8.4,2.95 -8.4,2.15 ; -8.1,2.15 -8.1,2.95 -7.9,2.95 -7.9,2.15 ; -7.6,2.15 -7.6,2.95 -7.4,2.95 -7.4,2.15 ; -7.1,2.15 -7.1,2.95 -6.9,2.95 -6.9,2.15 ; -6.6,2.15 -6.6,2.95 -6.4,2.95 -6.4,2.15 ; -6.1,2.15 -6.1,2.95 -5.9,2.95 -5.9,2.15 ; -5.6,2.15 -5.6,2.95 -5.4,2.95 -5.4,2.15 ; -5.1,2.15 -5.1,2.95 -4.9,2.95 -4.9,2.15 ; -4.6,2.15 -4.6,2.95 -4.4,2.95 -4.4,2.15 ; -4.1,2.15 -4.1,2.95 -3.9,2.95 -3.9,2.15 ; -3.6,2.15 -3.6,2.95 -3.4,2.95 -3.4,2.15 ; -3.1,2.15 -3.1,2.95 -2.9,2.95 -2.9,2.15 ; -2.6,2.15 -2.6,2.95 -2.4,2.95 -2.4,2.15 ; -2.1,2.15 -2.1,2.95 -1.9,2.95 -1.9,2.15 ; -1.6,2.15 -1.6,2.95 -1.4,2.95 -1.4,2.15 ; -1.1,2.15 -1.1,2.95 -0.9,2.95 -0.9,2.15 ; -0.6,2.15 -0.6,2.95 -0.4,2.95 -0.4,2.15 ; -0.1,2.15 -0.1,2.95 0.1,2.95 0.1,2.15 ; 0.4,2.15 0.4,2.95 0.6,2.95 0.6,2.15 ; 0.9,2.15 0.9,2.95 1.1,2.95 1.1,2.15 ; 1.4,2.15 1.4,2.95 1.6,2.95 1.6,2.15 ; 1.9,2.15 1.9,2.95 2.1,2.95 2.1,2.15 ; 2.4,2.15 2.4,2.95 2.6,2.95 2.6,2.15 ; 2.9,2.15 2.9,2.95 3.1,2.95 3.1,2.15 ; 3.4,2.15 3.4,2.95 3.6,2.95 3.6,2.15 ; 3.9,2.15 3.9,2.95 4.1,2.95 4.1,2.15 ; 4.4,2.15 4.4,2.95 4.6,2.95 4.6,2.15 ; 4.9,2.15 4.9,2.95 5.1,2.95 5.1,2.15 ; 5.4,2.15 5.4,2.95 5.6,2.95 5.6,2.15 ; 5.9,2.15 5.9,2.95 6.1,2.95 6.1,2.15 ; 6.4,2.15 6.4,2.95 6.6,2.95 6.6,2.15 ; 6.9,2.15 6.9,2.95 7.1,2.95 7.1,2.15 ; 7.4,2.15 7.4,2.95 7.6,2.95 7.6,2.15 ; 7.9,2.15 7.9,2.95 8.1,2.95 8.1,2.15 ; 8.4,2.15 8.4,2.95 8.6,2.95 8.6,2.15 ; -11.95,-2.15 11.95,-2.15 11.95,-0.85 11.35,-0.85 11.35,2.15 -11.35,2.15 -11.35,-0.85 -11.95,-0.85 -11.95,-2.15
Top Courtyard:
  lines w0.05: -0.5,0 0.5,0 ; 0,-0.5 0,0.5 ; -12.225,-2.425 12.225,-2.425 12.225,3.36 -12.225,3.36 -12.225,-2.425
3D body "68713514522.stp": height 2.1, standoff 0, extent -11.95,-2.15 11.95,2.95

## 68713614022 [mm] "ZIF Connectors, Horizontal, Top Contact, pitch 0.5mm, 36p"
height 2.25
pads (38):
  rect 0.3x1.2 smd: 1(-8.75,2.56) 2(-8.25,2.56) 3(-7.75,2.56) 4(-7.25,2.56) 5(-6.75,2.56) 6(-6.25,2.56) 7(-5.75,2.56) 8(-5.25,2.56) 9(-4.75,2.56) 10(-4.25,2.56) 11(-3.75,2.56) 12(-3.25,2.56) 13(-2.75,2.56) 14(-2.25,2.56) 15(-1.75,2.56) 16(-1.25,2.56) 17(-0.75,2.56) 18(-0.25,2.56) 19(0.25,2.56) 20(0.75,2.56) 21(1.25,2.56) 22(1.75,2.56) 23(2.25,2.56) 24(2.75,2.56) 25(3.25,2.56) 26(3.75,2.56) 27(4.25,2.56) 28(4.75,2.56) 29(5.25,2.56) 30(5.75,2.56) 31(6.25,2.56) 32(6.75,2.56) 33(7.25,2.56) 34(7.75,2.56) 35(8.25,2.56) 36(8.75,2.56)
  rect 2.7x3 smd: M1(-10.68,0.7) M2(10.68,0.7)
Top Overlay:
  circle w0.25: c-9.45,2.8 r0.125
  lines w0.2: -12.275,-1.1 -12.275,-2.225 12.275,-2.225 12.275,-1.1
Top Designator:
  text ".Designator" at -7.498,-0.5 h1.5
Top Component Outline:
  lines w0.1: -8.85,2.15 -8.85,2.95 -8.65,2.95 -8.65,2.15 ; -8.35,2.15 -8.35,2.95 -8.15,2.95 -8.15,2.15 ; -7.85,2.15 -7.85,2.95 -7.65,2.95 -7.65,2.15 ; -7.35,2.15 -7.35,2.95 -7.15,2.95 -7.15,2.15 ; -6.85,2.15 -6.85,2.95 -6.65,2.95 -6.65,2.15 ; -6.35,2.15 -6.35,2.95 -6.15,2.95 -6.15,2.15 ; -5.85,2.15 -5.85,2.95 -5.65,2.95 -5.65,2.15 ; -5.35,2.15 -5.35,2.95 -5.15,2.95 -5.15,2.15 ; -4.85,2.15 -4.85,2.95 -4.65,2.95 -4.65,2.15 ; -4.35,2.15 -4.35,2.95 -4.15,2.95 -4.15,2.15 ; -3.85,2.15 -3.85,2.95 -3.65,2.95 -3.65,2.15 ; -3.35,2.15 -3.35,2.95 -3.15,2.95 -3.15,2.15 ; -2.85,2.15 -2.85,2.95 -2.65,2.95 -2.65,2.15 ; -2.35,2.15 -2.35,2.95 -2.15,2.95 -2.15,2.15 ; -1.85,2.15 -1.85,2.95 -1.65,2.95 -1.65,2.15 ; -1.35,2.15 -1.35,2.95 -1.15,2.95 -1.15,2.15 ; -0.85,2.15 -0.85,2.95 -0.65,2.95 -0.65,2.15 ; -0.35,2.15 -0.35,2.95 -0.15,2.95 -0.15,2.15 ; 0.15,2.15 0.15,2.95 0.35,2.95 0.35,2.15 ; 0.65,2.15 0.65,2.95 0.85,2.95 0.85,2.15 ; 1.15,2.15 1.15,2.95 1.35,2.95 1.35,2.15 ; 1.65,2.15 1.65,2.95 1.85,2.95 1.85,2.15 ; 2.15,2.15 2.15,2.95 2.35,2.95 2.35,2.15 ; 2.65,2.15 2.65,2.95 2.85,2.95 2.85,2.15 ; 3.15,2.15 3.15,2.95 3.35,2.95 3.35,2.15 ; 3.65,2.15 3.65,2.95 3.85,2.95 3.85,2.15 ; 4.15,2.15 4.15,2.95 4.35,2.95 4.35,2.15 ; 4.65,2.15 4.65,2.95 4.85,2.95 4.85,2.15 ; 5.15,2.15 5.15,2.95 5.35,2.95 5.35,2.15 ; 5.65,2.15 5.65,2.95 5.85,2.95 5.85,2.15 ; 6.15,2.15 6.15,2.95 6.35,2.95 6.35,2.15 ; 6.65,2.15 6.65,2.95 6.85,2.95 6.85,2.15 ; 7.15,2.15 7.15,2.95 7.35,2.95 7.35,2.15 ; 7.65,2.15 7.65,2.95 7.85,2.95 7.85,2.15 ; 8.15,2.15 8.15,2.95 8.35,2.95 8.35,2.15 ; 8.65,2.15 8.65,2.95 8.85,2.95 8.85,2.15 ; -12.2,-2.15 -12.2,-0.85 -11.6,-0.85 -11.6,2.15 11.6,2.15 11.6,-0.85 12.2,-0.85 12.2,-2.15 -12.2,-2.15
Top 3D Body:
  lines w0.1: -8.85,2.15 -8.85,2.95 -8.65,2.95 -8.65,2.15 ; -8.35,2.15 -8.35,2.95 -8.15,2.95 -8.15,2.15 ; -7.85,2.15 -7.85,2.95 -7.65,2.95 -7.65,2.15 ; -7.35,2.15 -7.35,2.95 -7.15,2.95 -7.15,2.15 ; -6.85,2.15 -6.85,2.95 -6.65,2.95 -6.65,2.15 ; -6.35,2.15 -6.35,2.95 -6.15,2.95 -6.15,2.15 ; -5.85,2.15 -5.85,2.95 -5.65,2.95 -5.65,2.15 ; -5.35,2.15 -5.35,2.95 -5.15,2.95 -5.15,2.15 ; -4.85,2.15 -4.85,2.95 -4.65,2.95 -4.65,2.15 ; -4.35,2.15 -4.35,2.95 -4.15,2.95 -4.15,2.15 ; -3.85,2.15 -3.85,2.95 -3.65,2.95 -3.65,2.15 ; -3.35,2.15 -3.35,2.95 -3.15,2.95 -3.15,2.15 ; -2.85,2.15 -2.85,2.95 -2.65,2.95 -2.65,2.15 ; -2.35,2.15 -2.35,2.95 -2.15,2.95 -2.15,2.15 ; -1.85,2.15 -1.85,2.95 -1.65,2.95 -1.65,2.15 ; -1.35,2.15 -1.35,2.95 -1.15,2.95 -1.15,2.15 ; -0.85,2.15 -0.85,2.95 -0.65,2.95 -0.65,2.15 ; -0.35,2.15 -0.35,2.95 -0.15,2.95 -0.15,2.15 ; 0.15,2.15 0.15,2.95 0.35,2.95 0.35,2.15 ; 0.65,2.15 0.65,2.95 0.85,2.95 0.85,2.15 ; 1.15,2.15 1.15,2.95 1.35,2.95 1.35,2.15 ; 1.65,2.15 1.65,2.95 1.85,2.95 1.85,2.15 ; 2.15,2.15 2.15,2.95 2.35,2.95 2.35,2.15 ; 2.65,2.15 2.65,2.95 2.85,2.95 2.85,2.15 ; 3.15,2.15 3.15,2.95 3.35,2.95 3.35,2.15 ; 3.65,2.15 3.65,2.95 3.85,2.95 3.85,2.15 ; 4.15,2.15 4.15,2.95 4.35,2.95 4.35,2.15 ; 4.65,2.15 4.65,2.95 4.85,2.95 4.85,2.15 ; 5.15,2.15 5.15,2.95 5.35,2.95 5.35,2.15 ; 5.65,2.15 5.65,2.95 5.85,2.95 5.85,2.15 ; 6.15,2.15 6.15,2.95 6.35,2.95 6.35,2.15 ; 6.65,2.15 6.65,2.95 6.85,2.95 6.85,2.15 ; 7.15,2.15 7.15,2.95 7.35,2.95 7.35,2.15 ; 7.65,2.15 7.65,2.95 7.85,2.95 7.85,2.15 ; 8.15,2.15 8.15,2.95 8.35,2.95 8.35,2.15 ; 8.65,2.15 8.65,2.95 8.85,2.95 8.85,2.15 ; -12.2,-2.15 12.2,-2.15 12.2,-0.85 11.6,-0.85 11.6,2.15 -11.6,2.15 -11.6,-0.85 -12.2,-0.85 -12.2,-2.15
Top Courtyard:
  lines w0.05: -0.5,0 0.5,0 ; 0,-0.5 0,0.5 ; -12.475,-2.425 -12.475,3.36 12.475,3.36 12.475,-2.425 -12.475,-2.425
3D body "68713614022.stp": height 2.1, standoff 0, extent -12.2,-2.15 12.2,2.95

## 68714014022 [mm] "ZIF Connectors, Horizontal, Top Contact, pitch 0.5mm, 40p"
height 2.25
pads (42):
  rect 0.3x1.2 smd: 1(-9.75,2.56) 2(-9.25,2.56) 3(-8.75,2.56) 4(-8.25,2.56) 5(-7.75,2.56) 6(-7.25,2.56) 7(-6.75,2.56) 8(-6.25,2.56) 9(-5.75,2.56) 10(-5.25,2.56) 11(-4.75,2.56) 12(-4.25,2.56) 13(-3.75,2.56) 14(-3.25,2.56) 15(-2.75,2.56) 16(-2.25,2.56) 17(-1.75,2.56) 18(-1.25,2.56) 19(-0.75,2.56) 20(-0.25,2.56) 21(0.25,2.56) 22(0.75,2.56) 23(1.25,2.56) 24(1.75,2.56) 25(2.25,2.56) 26(2.75,2.56) 27(3.25,2.56) 28(3.75,2.56) 29(4.25,2.56) 30(4.75,2.56) 31(5.25,2.56) 32(5.75,2.56) 33(6.25,2.56) 34(6.75,2.56) 35(7.25,2.56) 36(7.75,2.56) 37(8.25,2.56) 38(8.75,2.56) 39(9.25,2.56) 40(9.75,2.56)
  rect 2.7x3 smd: M1(-11.68,0.7) M2(11.68,0.7)
Top Overlay:
  circle w0.25: c-10.45,2.8 r0.125
  lines w0.2: -13.275,-1.1 -13.275,-2.225 13.275,-2.225 13.275,-1.1
Top Designator:
  text ".Designator" at -7.498,-0.5 h1.5
Top Component Outline:
  lines w0.1: -9.85,2.15 -9.85,2.95 -9.65,2.95 -9.65,2.15 ; -9.35,2.15 -9.35,2.95 -9.15,2.95 -9.15,2.15 ; -8.85,2.15 -8.85,2.95 -8.65,2.95 -8.65,2.15 ; -8.35,2.15 -8.35,2.95 -8.15,2.95 -8.15,2.15 ; -7.85,2.15 -7.85,2.95 -7.65,2.95 -7.65,2.15 ; -7.35,2.15 -7.35,2.95 -7.15,2.95 -7.15,2.15 ; -6.85,2.15 -6.85,2.95 -6.65,2.95 -6.65,2.15 ; -6.35,2.15 -6.35,2.95 -6.15,2.95 -6.15,2.15 ; -5.85,2.15 -5.85,2.95 -5.65,2.95 -5.65,2.15 ; -5.35,2.15 -5.35,2.95 -5.15,2.95 -5.15,2.15 ; -4.85,2.15 -4.85,2.95 -4.65,2.95 -4.65,2.15 ; -4.35,2.15 -4.35,2.95 -4.15,2.95 -4.15,2.15 ; -3.85,2.15 -3.85,2.95 -3.65,2.95 -3.65,2.15 ; -3.35,2.15 -3.35,2.95 -3.15,2.95 -3.15,2.15 ; -2.85,2.15 -2.85,2.95 -2.65,2.95 -2.65,2.15 ; -2.35,2.15 -2.35,2.95 -2.15,2.95 -2.15,2.15 ; -1.85,2.15 -1.85,2.95 -1.65,2.95 -1.65,2.15 ; -1.35,2.15 -1.35,2.95 -1.15,2.95 -1.15,2.15 ; -0.85,2.15 -0.85,2.95 -0.65,2.95 -0.65,2.15 ; -0.35,2.15 -0.35,2.95 -0.15,2.95 -0.15,2.15 ; 0.15,2.15 0.15,2.95 0.35,2.95 0.35,2.15 ; 0.65,2.15 0.65,2.95 0.85,2.95 0.85,2.15 ; 1.15,2.15 1.15,2.95 1.35,2.95 1.35,2.15 ; 1.65,2.15 1.65,2.95 1.85,2.95 1.85,2.15 ; 2.15,2.15 2.15,2.95 2.35,2.95 2.35,2.15 ; 2.65,2.15 2.65,2.95 2.85,2.95 2.85,2.15 ; 3.15,2.15 3.15,2.95 3.35,2.95 3.35,2.15 ; 3.65,2.15 3.65,2.95 3.85,2.95 3.85,2.15 ; 4.15,2.15 4.15,2.95 4.35,2.95 4.35,2.15 ; 4.65,2.15 4.65,2.95 4.85,2.95 4.85,2.15 ; 5.15,2.15 5.15,2.95 5.35,2.95 5.35,2.15 ; 5.65,2.15 5.65,2.95 5.85,2.95 5.85,2.15 ; 6.15,2.15 6.15,2.95 6.35,2.95 6.35,2.15 ; 6.65,2.15 6.65,2.95 6.85,2.95 6.85,2.15 ; 7.15,2.15 7.15,2.95 7.35,2.95 7.35,2.15 ; 7.65,2.15 7.65,2.95 7.85,2.95 7.85,2.15 ; 8.15,2.15 8.15,2.95 8.35,2.95 8.35,2.15 ; 8.65,2.15 8.65,2.95 8.85,2.95 8.85,2.15 ; 9.15,2.15 9.15,2.95 9.35,2.95 9.35,2.15 ; 9.65,2.15 9.65,2.95 9.85,2.95 9.85,2.15 ; -13.2,-2.15 -13.2,-0.85 -12.6,-0.85 -12.6,2.15 12.6,2.15 12.6,-0.85 13.2,-0.85 13.2,-2.15 -13.2,-2.15
Top 3D Body:
  lines w0.1: -9.85,2.15 -9.85,2.95 -9.65,2.95 -9.65,2.15 ; -9.35,2.15 -9.35,2.95 -9.15,2.95 -9.15,2.15 ; -8.85,2.15 -8.85,2.95 -8.65,2.95 -8.65,2.15 ; -8.35,2.15 -8.35,2.95 -8.15,2.95 -8.15,2.15 ; -7.85,2.15 -7.85,2.95 -7.65,2.95 -7.65,2.15 ; -7.35,2.15 -7.35,2.95 -7.15,2.95 -7.15,2.15 ; -6.85,2.15 -6.85,2.95 -6.65,2.95 -6.65,2.15 ; -6.35,2.15 -6.35,2.95 -6.15,2.95 -6.15,2.15 ; -5.85,2.15 -5.85,2.95 -5.65,2.95 -5.65,2.15 ; -5.35,2.15 -5.35,2.95 -5.15,2.95 -5.15,2.15 ; -4.85,2.15 -4.85,2.95 -4.65,2.95 -4.65,2.15 ; -4.35,2.15 -4.35,2.95 -4.15,2.95 -4.15,2.15 ; -3.85,2.15 -3.85,2.95 -3.65,2.95 -3.65,2.15 ; -3.35,2.15 -3.35,2.95 -3.15,2.95 -3.15,2.15 ; -2.85,2.15 -2.85,2.95 -2.65,2.95 -2.65,2.15 ; -2.35,2.15 -2.35,2.95 -2.15,2.95 -2.15,2.15 ; -1.85,2.15 -1.85,2.95 -1.65,2.95 -1.65,2.15 ; -1.35,2.15 -1.35,2.95 -1.15,2.95 -1.15,2.15 ; -0.85,2.15 -0.85,2.95 -0.65,2.95 -0.65,2.15 ; -0.35,2.15 -0.35,2.95 -0.15,2.95 -0.15,2.15 ; 0.15,2.15 0.15,2.95 0.35,2.95 0.35,2.15 ; 0.65,2.15 0.65,2.95 0.85,2.95 0.85,2.15 ; 1.15,2.15 1.15,2.95 1.35,2.95 1.35,2.15 ; 1.65,2.15 1.65,2.95 1.85,2.95 1.85,2.15 ; 2.15,2.15 2.15,2.95 2.35,2.95 2.35,2.15 ; 2.65,2.15 2.65,2.95 2.85,2.95 2.85,2.15 ; 3.15,2.15 3.15,2.95 3.35,2.95 3.35,2.15 ; 3.65,2.15 3.65,2.95 3.85,2.95 3.85,2.15 ; 4.15,2.15 4.15,2.95 4.35,2.95 4.35,2.15 ; 4.65,2.15 4.65,2.95 4.85,2.95 4.85,2.15 ; 5.15,2.15 5.15,2.95 5.35,2.95 5.35,2.15 ; 5.65,2.15 5.65,2.95 5.85,2.95 5.85,2.15 ; 6.15,2.15 6.15,2.95 6.35,2.95 6.35,2.15 ; 6.65,2.15 6.65,2.95 6.85,2.95 6.85,2.15 ; 7.15,2.15 7.15,2.95 7.35,2.95 7.35,2.15 ; 7.65,2.15 7.65,2.95 7.85,2.95 7.85,2.15 ; 8.15,2.15 8.15,2.95 8.35,2.95 8.35,2.15 ; 8.65,2.15 8.65,2.95 8.85,2.95 8.85,2.15 ; 9.15,2.15 9.15,2.95 9.35,2.95 9.35,2.15 ; 9.65,2.15 9.65,2.95 9.85,2.95 9.85,2.15 ; -13.2,-2.15 13.2,-2.15 13.2,-0.85 12.6,-0.85 12.6,2.15 -12.6,2.15 -12.6,-0.85 -13.2,-0.85 -13.2,-2.15
Top Courtyard:
  lines w0.05: -0.5,0 0.5,0 ; 0,-0.5 0,0.5 ; -13.475,-2.425 -13.475,3.36 13.475,3.36 13.475,-2.425 -13.475,-2.425
3D body "68714014022.stp": height 2.1, standoff 0, extent -13.2,-2.15 13.2,2.95

## 68714014522 [mm] "ZIF Connectors, Horizontal, Bottom Contact, pitch 0.5mm, 40p"
height 2.25
pads (42):
  rect 0.3x1.2 smd: 1(-9.75,2.56) 2(-9.25,2.56) 3(-8.75,2.56) 4(-8.25,2.56) 5(-7.75,2.56) 6(-7.25,2.56) 7(-6.75,2.56) 8(-6.25,2.56) 9(-5.75,2.56) 10(-5.25,2.56) 11(-4.75,2.56) 12(-4.25,2.56) 13(-3.75,2.56) 14(-3.25,2.56) 15(-2.75,2.56) 16(-2.25,2.56) 17(-1.75,2.56) 18(-1.25,2.56) 19(-0.75,2.56) 20(-0.25,2.56) 21(0.25,2.56) 22(0.75,2.56) 23(1.25,2.56) 24(1.75,2.56) 25(2.25,2.56) 26(2.75,2.56) 27(3.25,2.56) 28(3.75,2.56) 29(4.25,2.56) 30(4.75,2.56) 31(5.25,2.56) 32(5.75,2.56) 33(6.25,2.56) 34(6.75,2.56) 35(7.25,2.56) 36(7.75,2.56) 37(8.25,2.56) 38(8.75,2.56) 39(9.25,2.56) 40(9.75,2.56)
  rect 2.7x3 smd: M1(-11.68,0.7) M2(11.68,0.7)
Top Overlay:
  circle w0.25: c-10.4,2.7 r0.125
  lines w0.2: -13.275,-1.125 -13.275,-2.225 13.275,-2.225 13.275,-1.125
Top Designator:
  text ".Designator" at -7.498,-0.5 h1.5
Top Component Outline:
  lines w0.1: -9.85,2.15 -9.85,2.95 -9.65,2.95 -9.65,2.15 ; -9.35,2.15 -9.35,2.95 -9.15,2.95 -9.15,2.15 ; -8.85,2.15 -8.85,2.95 -8.65,2.95 -8.65,2.15 ; -8.35,2.15 -8.35,2.95 -8.15,2.95 -8.15,2.15 ; -7.85,2.15 -7.85,2.95 -7.65,2.95 -7.65,2.15 ; -7.35,2.15 -7.35,2.95 -7.15,2.95 -7.15,2.15 ; -6.85,2.15 -6.85,2.95 -6.65,2.95 -6.65,2.15 ; -6.35,2.15 -6.35,2.95 -6.15,2.95 -6.15,2.15 ; -5.85,2.15 -5.85,2.95 -5.65,2.95 -5.65,2.15 ; -5.35,2.15 -5.35,2.95 -5.15,2.95 -5.15,2.15 ; -4.85,2.15 -4.85,2.95 -4.65,2.95 -4.65,2.15 ; -4.35,2.15 -4.35,2.95 -4.15,2.95 -4.15,2.15 ; -3.85,2.15 -3.85,2.95 -3.65,2.95 -3.65,2.15 ; -3.35,2.15 -3.35,2.95 -3.15,2.95 -3.15,2.15 ; -2.85,2.15 -2.85,2.95 -2.65,2.95 -2.65,2.15 ; -2.35,2.15 -2.35,2.95 -2.15,2.95 -2.15,2.15 ; -1.85,2.15 -1.85,2.95 -1.65,2.95 -1.65,2.15 ; -1.35,2.15 -1.35,2.95 -1.15,2.95 -1.15,2.15 ; -0.85,2.15 -0.85,2.95 -0.65,2.95 -0.65,2.15 ; -0.35,2.15 -0.35,2.95 -0.15,2.95 -0.15,2.15 ; 0.15,2.15 0.15,2.95 0.35,2.95 0.35,2.15 ; 0.65,2.15 0.65,2.95 0.85,2.95 0.85,2.15 ; 1.15,2.15 1.15,2.95 1.35,2.95 1.35,2.15 ; 1.65,2.15 1.65,2.95 1.85,2.95 1.85,2.15 ; 2.15,2.15 2.15,2.95 2.35,2.95 2.35,2.15 ; 2.65,2.15 2.65,2.95 2.85,2.95 2.85,2.15 ; 3.15,2.15 3.15,2.95 3.35,2.95 3.35,2.15 ; 3.65,2.15 3.65,2.95 3.85,2.95 3.85,2.15 ; 4.15,2.15 4.15,2.95 4.35,2.95 4.35,2.15 ; 4.65,2.15 4.65,2.95 4.85,2.95 4.85,2.15 ; 5.15,2.15 5.15,2.95 5.35,2.95 5.35,2.15 ; 5.65,2.15 5.65,2.95 5.85,2.95 5.85,2.15 ; 6.15,2.15 6.15,2.95 6.35,2.95 6.35,2.15 ; 6.65,2.15 6.65,2.95 6.85,2.95 6.85,2.15 ; 7.15,2.15 7.15,2.95 7.35,2.95 7.35,2.15 ; 7.65,2.15 7.65,2.95 7.85,2.95 7.85,2.15 ; 8.15,2.15 8.15,2.95 8.35,2.95 8.35,2.15 ; 8.65,2.15 8.65,2.95 8.85,2.95 8.85,2.15 ; 9.15,2.15 9.15,2.95 9.35,2.95 9.35,2.15 ; 9.65,2.15 9.65,2.95 9.85,2.95 9.85,2.15 ; -13.2,-2.15 -13.2,-0.85 -12.6,-0.85 -12.6,2.15 12.6,2.15 12.6,-0.85 13.2,-0.85 13.2,-2.15 -13.2,-2.15
Top 3D Body:
  lines w0.1: -9.85,2.15 -9.85,2.95 -9.65,2.95 -9.65,2.15 ; -9.35,2.15 -9.35,2.95 -9.15,2.95 -9.15,2.15 ; -8.85,2.15 -8.85,2.95 -8.65,2.95 -8.65,2.15 ; -8.35,2.15 -8.35,2.95 -8.15,2.95 -8.15,2.15 ; -7.85,2.15 -7.85,2.95 -7.65,2.95 -7.65,2.15 ; -7.35,2.15 -7.35,2.95 -7.15,2.95 -7.15,2.15 ; -6.85,2.15 -6.85,2.95 -6.65,2.95 -6.65,2.15 ; -6.35,2.15 -6.35,2.95 -6.15,2.95 -6.15,2.15 ; -5.85,2.15 -5.85,2.95 -5.65,2.95 -5.65,2.15 ; -5.35,2.15 -5.35,2.95 -5.15,2.95 -5.15,2.15 ; -4.85,2.15 -4.85,2.95 -4.65,2.95 -4.65,2.15 ; -4.35,2.15 -4.35,2.95 -4.15,2.95 -4.15,2.15 ; -3.85,2.15 -3.85,2.95 -3.65,2.95 -3.65,2.15 ; -3.35,2.15 -3.35,2.95 -3.15,2.95 -3.15,2.15 ; -2.85,2.15 -2.85,2.95 -2.65,2.95 -2.65,2.15 ; -2.35,2.15 -2.35,2.95 -2.15,2.95 -2.15,2.15 ; -1.85,2.15 -1.85,2.95 -1.65,2.95 -1.65,2.15 ; -1.35,2.15 -1.35,2.95 -1.15,2.95 -1.15,2.15 ; -0.85,2.15 -0.85,2.95 -0.65,2.95 -0.65,2.15 ; -0.35,2.15 -0.35,2.95 -0.15,2.95 -0.15,2.15 ; 0.15,2.15 0.15,2.95 0.35,2.95 0.35,2.15 ; 0.65,2.15 0.65,2.95 0.85,2.95 0.85,2.15 ; 1.15,2.15 1.15,2.95 1.35,2.95 1.35,2.15 ; 1.65,2.15 1.65,2.95 1.85,2.95 1.85,2.15 ; 2.15,2.15 2.15,2.95 2.35,2.95 2.35,2.15 ; 2.65,2.15 2.65,2.95 2.85,2.95 2.85,2.15 ; 3.15,2.15 3.15,2.95 3.35,2.95 3.35,2.15 ; 3.65,2.15 3.65,2.95 3.85,2.95 3.85,2.15 ; 4.15,2.15 4.15,2.95 4.35,2.95 4.35,2.15 ; 4.65,2.15 4.65,2.95 4.85,2.95 4.85,2.15 ; 5.15,2.15 5.15,2.95 5.35,2.95 5.35,2.15 ; 5.65,2.15 5.65,2.95 5.85,2.95 5.85,2.15 ; 6.15,2.15 6.15,2.95 6.35,2.95 6.35,2.15 ; 6.65,2.15 6.65,2.95 6.85,2.95 6.85,2.15 ; 7.15,2.15 7.15,2.95 7.35,2.95 7.35,2.15 ; 7.65,2.15 7.65,2.95 7.85,2.95 7.85,2.15 ; 8.15,2.15 8.15,2.95 8.35,2.95 8.35,2.15 ; 8.65,2.15 8.65,2.95 8.85,2.95 8.85,2.15 ; 9.15,2.15 9.15,2.95 9.35,2.95 9.35,2.15 ; 9.65,2.15 9.65,2.95 9.85,2.95 9.85,2.15 ; -13.2,-2.15 13.2,-2.15 13.2,-0.85 12.6,-0.85 12.6,2.15 -12.6,2.15 -12.6,-0.85 -13.2,-0.85 -13.2,-2.15
Top Courtyard:
  lines w0.05: -0.5,0 0.5,0 ; 0,-0.5 0,0.5 ; -13.475,-2.425 13.475,-2.425 13.475,3.36 -13.475,3.36 -13.475,-2.425
3D body "68714014522.stp": height 2.1, standoff 0, extent -13.2,-2.15 13.2,2.95

## 68714414022 [mm] "ZIF Connectors, Horizontal, Top Contact, pitch 0.5mm, 44p"
height 2.25
pads (46):
  rect 0.3x1.2 smd: 1(-10.75,2.56) 2(-10.25,2.56) 3(-9.75,2.56) 4(-9.25,2.56) 5(-8.75,2.56) 6(-8.25,2.56) 7(-7.75,2.56) 8(-7.25,2.56) 9(-6.75,2.56) 10(-6.25,2.56) 11(-5.75,2.56) 12(-5.25,2.56) 13(-4.75,2.56) 14(-4.25,2.56) 15(-3.75,2.56) 16(-3.25,2.56) 17(-2.75,2.56) 18(-2.25,2.56) 19(-1.75,2.56) 20(-1.25,2.56) 21(-0.75,2.56) 22(-0.25,2.56) 23(0.25,2.56) 24(0.75,2.56) 25(1.25,2.56) 26(1.75,2.56) 27(2.25,2.56) 28(2.75,2.56) 29(3.25,2.56) 30(3.75,2.56) 31(4.25,2.56) 32(4.75,2.56) 33(5.25,2.56) 34(5.75,2.56) 35(6.25,2.56) 36(6.75,2.56) 37(7.25,2.56) 38(7.75,2.56) 39(8.25,2.56) 40(8.75,2.56) 41(9.25,2.56) 42(9.75,2.56) 43(10.25,2.56) 44(10.75,2.56)
  rect 2.7x3 smd: M1(-12.68,0.7) M2(12.68,0.7)
Top Overlay:
  circle w0.25: c-11.45,2.8 r0.125
  lines w0.2: -14.275,-1.1 -14.275,-2.225 14.275,-2.225 14.275,-1.1
Top Designator:
  text ".Designator" at -7.498,-0.5 h1.5
Top Component Outline:
  lines w0.1: -10.85,2.15 -10.85,2.95 -10.65,2.95 -10.65,2.15 ; -10.35,2.15 -10.35,2.95 -10.15,2.95 -10.15,2.15 ; -9.85,2.15 -9.85,2.95 -9.65,2.95 -9.65,2.15 ; -9.35,2.15 -9.35,2.95 -9.15,2.95 -9.15,2.15 ; -8.85,2.15 -8.85,2.95 -8.65,2.95 -8.65,2.15 ; -8.35,2.15 -8.35,2.95 -8.15,2.95 -8.15,2.15 ; -7.85,2.15 -7.85,2.95 -7.65,2.95 -7.65,2.15 ; -7.35,2.15 -7.35,2.95 -7.15,2.95 -7.15,2.15 ; -6.85,2.15 -6.85,2.95 -6.65,2.95 -6.65,2.15 ; -6.35,2.15 -6.35,2.95 -6.15,2.95 -6.15,2.15 ; -5.85,2.15 -5.85,2.95 -5.65,2.95 -5.65,2.15 ; -5.35,2.15 -5.35,2.95 -5.15,2.95 -5.15,2.15 ; -4.85,2.15 -4.85,2.95 -4.65,2.95 -4.65,2.15 ; -4.35,2.15 -4.35,2.95 -4.15,2.95 -4.15,2.15 ; -3.85,2.15 -3.85,2.95 -3.65,2.95 -3.65,2.15 ; -3.35,2.15 -3.35,2.95 -3.15,2.95 -3.15,2.15 ; -2.85,2.15 -2.85,2.95 -2.65,2.95 -2.65,2.15 ; -2.35,2.15 -2.35,2.95 -2.15,2.95 -2.15,2.15 ; -1.85,2.15 -1.85,2.95 -1.65,2.95 -1.65,2.15 ; -1.35,2.15 -1.35,2.95 -1.15,2.95 -1.15,2.15 ; -0.85,2.15 -0.85,2.95 -0.65,2.95 -0.65,2.15 ; -0.35,2.15 -0.35,2.95 -0.15,2.95 -0.15,2.15 ; 0.15,2.15 0.15,2.95 0.35,2.95 0.35,2.15 ; 0.65,2.15 0.65,2.95 0.85,2.95 0.85,2.15 ; 1.15,2.15 1.15,2.95 1.35,2.95 1.35,2.15 ; 1.65,2.15 1.65,2.95 1.85,2.95 1.85,2.15 ; 2.15,2.15 2.15,2.95 2.35,2.95 2.35,2.15 ; 2.65,2.15 2.65,2.95 2.85,2.95 2.85,2.15 ; 3.15,2.15 3.15,2.95 3.35,2.95 3.35,2.15 ; 3.65,2.15 3.65,2.95 3.85,2.95 3.85,2.15 ; 4.15,2.15 4.15,2.95 4.35,2.95 4.35,2.15 ; 4.65,2.15 4.65,2.95 4.85,2.95 4.85,2.15 ; 5.15,2.15 5.15,2.95 5.35,2.95 5.35,2.15 ; 5.65,2.15 5.65,2.95 5.85,2.95 5.85,2.15 ; 6.15,2.15 6.15,2.95 6.35,2.95 6.35,2.15 ; 6.65,2.15 6.65,2.95 6.85,2.95 6.85,2.15 ; 7.15,2.15 7.15,2.95 7.35,2.95 7.35,2.15 ; 7.65,2.15 7.65,2.95 7.85,2.95 7.85,2.15 ; 8.15,2.15 8.15,2.95 8.35,2.95 8.35,2.15 ; 8.65,2.15 8.65,2.95 8.85,2.95 8.85,2.15 ; 9.15,2.15 9.15,2.95 9.35,2.95 9.35,2.15 ; 9.65,2.15 9.65,2.95 9.85,2.95 9.85,2.15 ; 10.15,2.15 10.15,2.95 10.35,2.95 10.35,2.15 ; 10.65,2.15 10.65,2.95 10.85,2.95 10.85,2.15 ; -14.2,-2.15 -14.2,-0.85 -13.6,-0.85 -13.6,2.15 13.6,2.15 13.6,-0.85 14.2,-0.85 14.2,-2.15 -14.2,-2.15
Top 3D Body:
  lines w0.1: -10.85,2.15 -10.85,2.95 -10.65,2.95 -10.65,2.15 ; -10.35,2.15 -10.35,2.95 -10.15,2.95 -10.15,2.15 ; -9.85,2.15 -9.85,2.95 -9.65,2.95 -9.65,2.15 ; -9.35,2.15 -9.35,2.95 -9.15,2.95 -9.15,2.15 ; -8.85,2.15 -8.85,2.95 -8.65,2.95 -8.65,2.15 ; -8.35,2.15 -8.35,2.95 -8.15,2.95 -8.15,2.15 ; -7.85,2.15 -7.85,2.95 -7.65,2.95 -7.65,2.15 ; -7.35,2.15 -7.35,2.95 -7.15,2.95 -7.15,2.15 ; -6.85,2.15 -6.85,2.95 -6.65,2.95 -6.65,2.15 ; -6.35,2.15 -6.35,2.95 -6.15,2.95 -6.15,2.15 ; -5.85,2.15 -5.85,2.95 -5.65,2.95 -5.65,2.15 ; -5.35,2.15 -5.35,2.95 -5.15,2.95 -5.15,2.15 ; -4.85,2.15 -4.85,2.95 -4.65,2.95 -4.65,2.15 ; -4.35,2.15 -4.35,2.95 -4.15,2.95 -4.15,2.15 ; -3.85,2.15 -3.85,2.95 -3.65,2.95 -3.65,2.15 ; -3.35,2.15 -3.35,2.95 -3.15,2.95 -3.15,2.15 ; -2.85,2.15 -2.85,2.95 -2.65,2.95 -2.65,2.15 ; -2.35,2.15 -2.35,2.95 -2.15,2.95 -2.15,2.15 ; -1.85,2.15 -1.85,2.95 -1.65,2.95 -1.65,2.15 ; -1.35,2.15 -1.35,2.95 -1.15,2.95 -1.15,2.15 ; -0.85,2.15 -0.85,2.95 -0.65,2.95 -0.65,2.15 ; -0.35,2.15 -0.35,2.95 -0.15,2.95 -0.15,2.15 ; 0.15,2.15 0.15,2.95 0.35,2.95 0.35,2.15 ; 0.65,2.15 0.65,2.95 0.85,2.95 0.85,2.15 ; 1.15,2.15 1.15,2.95 1.35,2.95 1.35,2.15 ; 1.65,2.15 1.65,2.95 1.85,2.95 1.85,2.15 ; 2.15,2.15 2.15,2.95 2.35,2.95 2.35,2.15 ; 2.65,2.15 2.65,2.95 2.85,2.95 2.85,2.15 ; 3.15,2.15 3.15,2.95 3.35,2.95 3.35,2.15 ; 3.65,2.15 3.65,2.95 3.85,2.95 3.85,2.15 ; 4.15,2.15 4.15,2.95 4.35,2.95 4.35,2.15 ; 4.65,2.15 4.65,2.95 4.85,2.95 4.85,2.15 ; 5.15,2.15 5.15,2.95 5.35,2.95 5.35,2.15 ; 5.65,2.15 5.65,2.95 5.85,2.95 5.85,2.15 ; 6.15,2.15 6.15,2.95 6.35,2.95 6.35,2.15 ; 6.65,2.15 6.65,2.95 6.85,2.95 6.85,2.15 ; 7.15,2.15 7.15,2.95 7.35,2.95 7.35,2.15 ; 7.65,2.15 7.65,2.95 7.85,2.95 7.85,2.15 ; 8.15,2.15 8.15,2.95 8.35,2.95 8.35,2.15 ; 8.65,2.15 8.65,2.95 8.85,2.95 8.85,2.15 ; 9.15,2.15 9.15,2.95 9.35,2.95 9.35,2.15 ; 9.65,2.15 9.65,2.95 9.85,2.95 9.85,2.15 ; 10.15,2.15 10.15,2.95 10.35,2.95 10.35,2.15 ; 10.65,2.15 10.65,2.95 10.85,2.95 10.85,2.15 ; -14.2,-2.15 14.2,-2.15 14.2,-0.85 13.6,-0.85 13.6,2.15 -13.6,2.15 -13.6,-0.85 -14.2,-0.85 -14.2,-2.15
Top Courtyard:
  lines w0.05: -0.5,0 0.5,0 ; 0,-0.5 0,0.5 ; -14.475,-2.425 -14.475,3.36 14.475,3.36 14.475,-2.425 -14.475,-2.425
3D body "68714414022.stp": height 2.1, standoff 0, extent -14.2,-2.15 14.2,2.95